# Altium footprint library Footprint-Lib-PhilsLab.PcbLib: 352 footprints (part 8 of 22)
Each footprint in its own frame and in the unit in brackets; x right, y up, seen from the top. Pads: shape width x height; smd on the part's side, far side on the other; paste and mask are expansions set on the pad; w line width, h text height; cw(c..) or ccw(c..) is an arc to the next point about the centre after c.
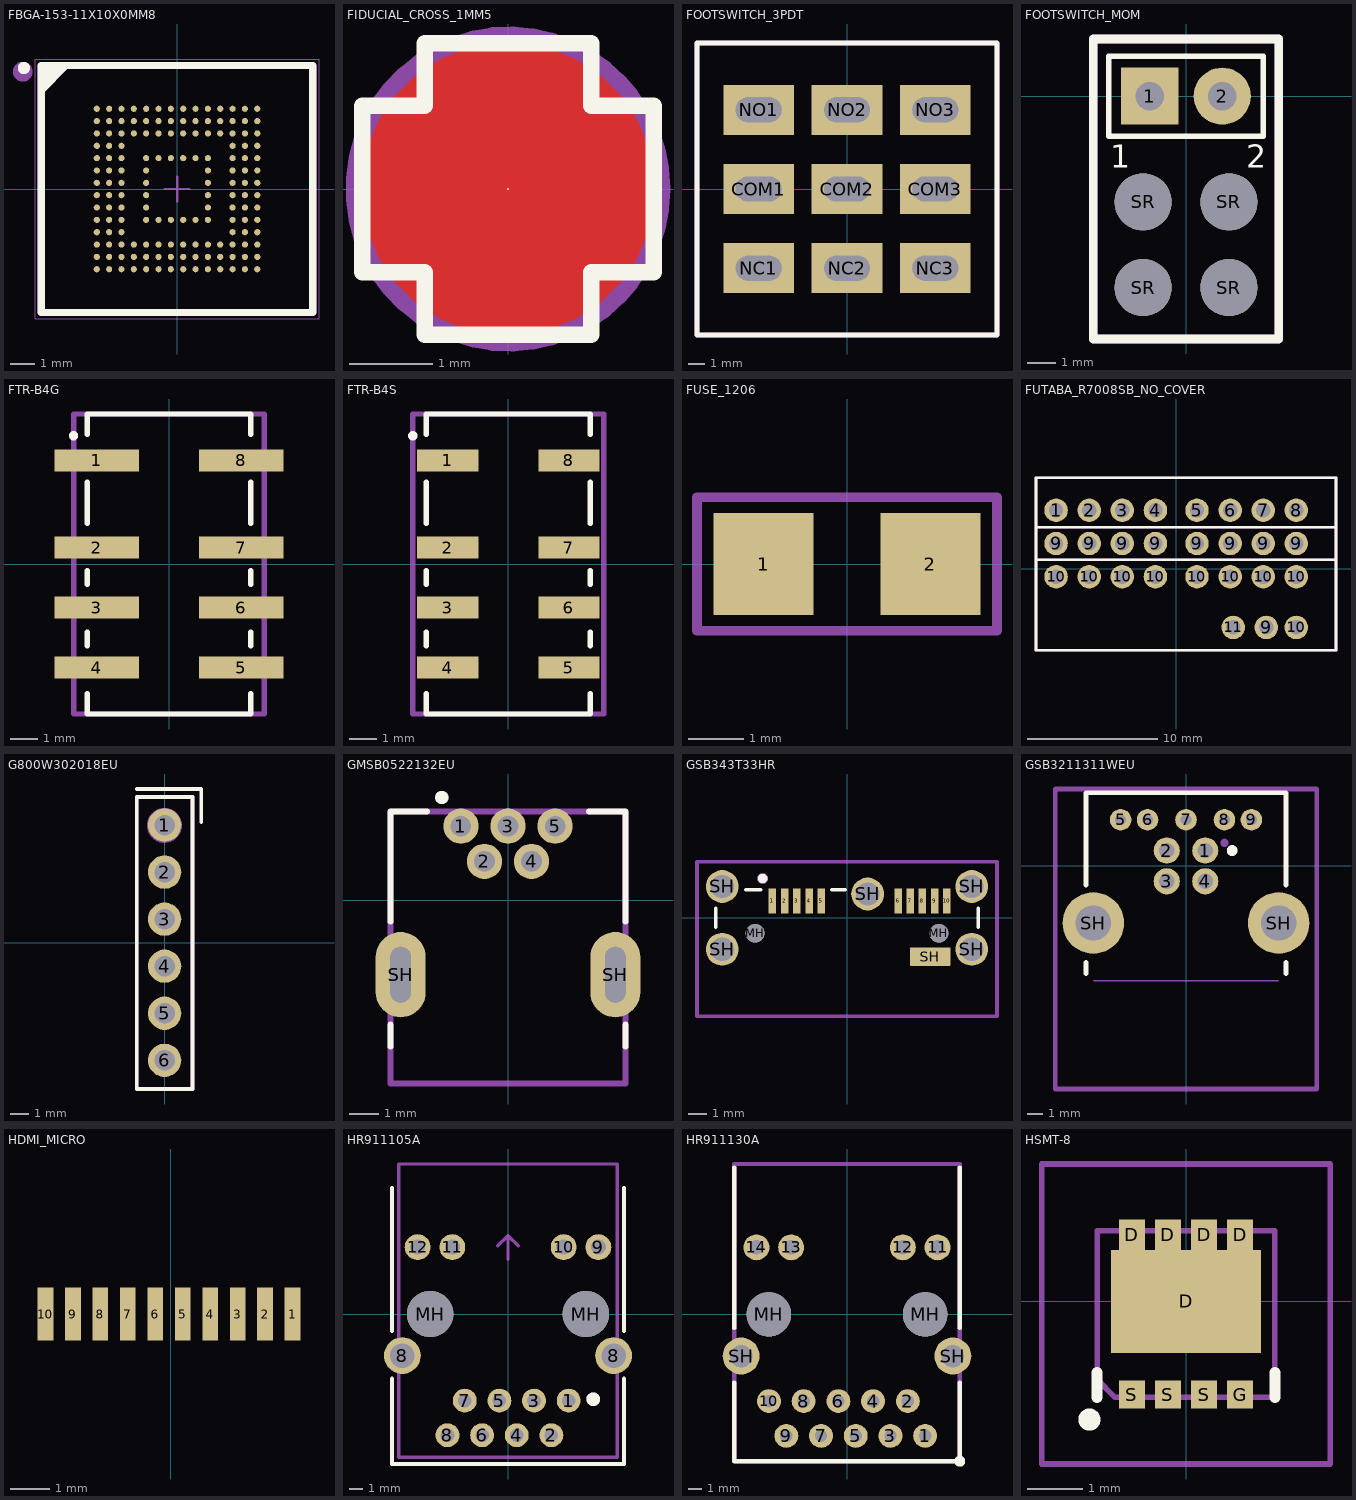
[diagram p7: the footprints below, top view; thin cyan lines are the x and y axes]

## FBGA-153-11X10X0MM8 [mm]
height 0.8
pads (152):
  round 0.25 smd: A1(-3.25,3.25) A2(-2.75,3.25) A3(-2.25,3.25) A4(-1.75,3.25) A5(-1.25,3.25) A6(-0.75,3.25) A7(-0.25,3.25) A8(0.25,3.25) A9(0.75,3.25) A10(1.25,3.25) A11(1.75,3.25) A12(2.25,3.25) A13(2.75,3.25) A14(3.25,3.25) B1(-3.25,2.75) B2(-2.75,2.75) B3(-2.25,2.75) B4(-1.75,2.75) B5(-1.25,2.75) B6(-0.75,2.75) B7(-0.25,2.75) B8(0.25,2.75) B9(0.75,2.75) B10(1.25,2.75) B11(1.75,2.75) B12(2.25,2.75) B13(2.75,2.75) B14(3.25,2.75) C1(-3.25,2.25) C2(-2.75,2.25) C3(-2.25,2.25) C4(-1.75,2.25) C5(-1.25,2.25) C6(-0.75,2.25) C7(-0.25,2.25) C8(0.25,2.25) C9(0.75,2.25) C10(1.25,2.25) C11(1.75,2.25) C12(2.25,2.25) C13(2.75,2.25) C14(3.25,2.25) D1(-3.25,1.75) D2(-2.75,1.75) D3(-2.25,1.75) D12(2.25,1.75) D13(2.75,1.75) D14(3.25,1.75) E1(-3.25,1.25) E2(-2.75,1.25) E3(-2.25,1.25) E5(-1.25,1.25) E6(-0.75,1.25) E7(-0.25,1.25) E8(0.25,1.25) E9(0.75,1.25) E10(1.25,1.25) E12(2.25,1.25) E13(2.75,1.25) E14(3.25,1.25) F1(-3.25,0.75) F2(-2.75,0.75) F3(-2.25,0.75) F5(-1.25,0.75) F10(1.25,0.75) F12(2.25,0.75) F13(2.75,0.75) F14(3.25,0.75) G1(-3.25,0.25) G2(-2.75,0.25) G3(-2.25,0.25) G5(-1.25,0.25) G10(1.25,0.25) G12(2.25,0.25) G13(2.75,0.25) G14(3.25,0.25) H1(-3.25,-0.25) H2(-2.75,-0.25) H3(-2.25,-0.25) H5(-1.25,-0.25) H10(1.25,-0.25) H12(2.25,-0.25) H13(2.75,-0.25) H14(3.25,-0.25) J1(-3.25,-0.75) J2(-2.75,-0.75) J3(-2.25,-0.75) J5(-1.25,-0.75) J10(1.25,-0.75) J12(2.25,-0.75) J13(2.75,-0.75) J14(3.25,-0.75) K1(-3.25,-1.25) K2(-2.75,-1.25) K3(-2.25,-1.25) K5(-1.25,-1.25) K6(-0.75,-1.25) K7(-0.25,-1.25) K8(0.25,-1.25) K9(0.75,-1.25) K10(1.25,-1.25) K12(2.25,-1.25) K13(2.75,-1.25) K14(3.25,-1.25) L1(-3.25,-1.75) L2(-2.75,-1.75) L3(-2.25,-1.75) L12(2.25,-1.75) L13(2.75,-1.75) L14(3.25,-1.75) M1(-3.25,-2.25) M2(-2.75,-2.25) M3(-2.25,-2.25) M4(-1.75,-2.25) M5(-1.25,-2.25) M6(-0.75,-2.25) M7(-0.25,-2.25) M8(0.25,-2.25) M9(0.75,-2.25) M10(1.25,-2.25) M11(1.75,-2.25) M12(2.25,-2.25) M13(2.75,-2.25) M14(3.25,-2.25) N1(-3.25,-2.75) N2(-2.75,-2.75) N3(-2.25,-2.75) N4(-1.75,-2.75) N5(-1.25,-2.75) N6(-0.75,-2.75) N7(-0.25,-2.75) N8(0.25,-2.75) N9(0.75,-2.75) N10(1.25,-2.75) N11(1.75,-2.75) N12(2.25,-2.75) N13(2.75,-2.75) N14(3.25,-2.75) P1(-3.25,-3.25) P2(-2.75,-3.25) P3(-2.25,-3.25) P4(-1.75,-3.25) P5(-1.25,-3.25) P6(-0.75,-3.25) P7(-0.25,-3.25) P8(0.25,-3.25) P9(0.75,-3.25) P10(1.25,-3.25) P11(1.75,-3.25) P12(2.25,-3.25) P13(2.75,-3.25) P14(3.25,-3.25)
Top Overlay:
  circle w0.25: c-6.2,4.9 r0.125
  region: -4.5,5 -5.5,4 -5.5,5
  lines w0.3: -5.5,4 -4.5,5 ; -5.5,-5 5.5,-5 5.5,5 -5.5,5 -5.5,-5
Mechanical 13:
  circle w0.5: c-6.25,4.75 r0.15
  lines w0.3: -5.5,-5 5.5,-5 5.5,5 -5.5,5 -5.5,-5
  text "'.Designator'" at -5.665,-0.417 h1
Mechanical 15:
  lines w0.05: -5.75,-5.25 5.75,-5.25 5.75,5.25 -5.75,5.25 -5.75,-5.25
  lines w0.1: -0.5,0 0.5,0 ; 0,-0.5 0,0.5
3D body "FBGA-153-11X10X0MM8.step": height 0.8, standoff 0, extent -5.5,-5 5.5,5

## FIDUCIAL_CROSS_1MM5 [mil]
pads (1):
  round 1 smd paste-19.68: FM(0,0)
Top Layer:
  pour cut-out: 0,68.9 6.79,68.9 20.1,66.25 32.64,61.06 43.92,53.52 53.52,43.92 61.06,32.64 66.25,20.1 68.9,6.79 68.9,0 68.9,-6.79 66.25,-20.1 61.06,-32.64 53.52,-43.92 43.92,-53.52 32.64,-61.06 20.1,-66.25 6.79,-68.9 0,-68.9 -6.79,-68.9 -20.1,-66.25 -32.64,-61.06 -43.92,-53.52 -53.52,-43.92 -61.06,-32.64 -66.25,-20.1 -68.9,-6.79 -68.9,0 -68.9,6.79 -66.25,20.1 -61.06,32.64 -53.52,43.92 -43.92,53.52 -32.64,61.06 -20.1,66.25 -6.79,68.9
  region: -9.84,-29.53 -9.84,-9.84 -29.53,-9.84 -29.53,9.84 -9.84,9.84 -9.84,29.53 9.84,29.53 9.84,9.84 29.53,9.84 29.53,-9.84 9.84,-9.84 9.84,-29.53
Top Overlay:
  lines w7.87: -68.9,-39.37 -68.9,0 -68.9,39.37 -39.37,39.37 -39.37,68.9 39.37,68.9 39.37,39.37 68.9,39.37 68.9,-39.37 39.37,-39.37 39.37,-68.9 -39.37,-68.9 -39.37,-39.37 -68.9,-39.37
Top Solder:
  region: -59.06,29.53 -29.53,29.53 -29.53,59.06 29.53,59.06 29.53,29.53 59.06,29.53 59.06,-29.53 29.53,-29.53 29.53,-59.06 -29.53,-59.06 -29.53,-29.53 -59.06,-29.53
Mechanical 13:
  circle w11.81: c0,0 r70.98
  text "'.Designator'" at -223.03,-16.4 h39.37

## FOOTSWITCH_3PDT [mm]
pads (9):
  rect 4.25x3 hole 1.5 slot 2.75 at 0 deg: COM1(-5.3,0) COM2(0,0) COM3(5.3,0) NC1(-5.3,-4.75) NC2(0,-4.75) NC3(5.3,-4.75) NO1(-5.3,4.75) NO2(0,4.75) NO3(5.3,4.75)
Top Overlay:
  lines w0.3: -9,-8.75 9,-8.75 9,8.75 -6.5,8.75 -9,8.75 -9,-8.75
Mechanical 13:
  lines w0.3: -9,-8.75 9,-8.75 9,8.75 -9,8.75 -9,-8.75
  text "'.Designator'" at -5.665,-0.417 h1
3D body "3PDT_Footswitch_NoNutNoWasher.step": height 37.96, standoff -4.14, extent -9.8,-8.5 9.8,8.5

## FOOTSWITCH_MOM [mm]
pads (6):
  rect 2x2 hole 1 mask+0.1: 1(-1.27,0)
  round 2 hole 1 mask+0.1: 2(1.27,0)
  round 2 hole 2 unplated mask+0.1: SR(-1.5,-6.7) SR(-1.5,-3.7) SR(1.5,-6.7) SR(1.5,-3.7)
Top Overlay:
  lines w0.2: -2.7,-1.4 -2.7,1.4 2.7,1.4 2.7,-1.4 -2.7,-1.4
  lines w0.3: -3.25,-8.5 -3.25,2 3.25,2 3.25,-8.5 -3.25,-8.5
  text "2" at 2.117,-2.5 h0.8
  text "1" at -2.65,-2.5 h0.8
Mechanical 13:
  lines w0.3: -3.25,-8.5 -3.25,2 3.25,2 3.25,-8.5 -3.25,-8.5
  text "STRAIN RELIEF" at -2.399,-6.52 h0.8
  text "2" at 2.117,-2.5 h0.8
  text "1" at -2.65,-2.5 h0.8
  text "'.Designator'" at -5.665,-0.417 h1
3D body "Header_1x2.STEP": height 8.44, standoff -2.54, extent -2.535,-1.273 2.545,1.267

## FTR-B4G [mm]
pads (8):
  rect 3.1x0.8 smd: 1(-2.65,3.8) 2(-2.65,0.6) 3(-2.65,-1.6) 4(-2.65,-3.8) 5(2.65,-3.8) 6(2.65,-1.6) 7(2.65,0.6) 8(2.65,3.8)
Top Overlay:
  circle w0.3: c-3.5,4.7 r0.021
  lines w0.2: -3,-4.75 -3,-5.5 3,-5.5 3,-4.75 ; -3,-3 -3,-2.5 ; -3,-0.75 -3,-0.25 ; -3,1.5 -3,3 ; -3,4.75 -3,5.5 3,5.5 3,4.75 ; 3,-3 3,-2.5 ; 3,-0.75 3,-0.25 ; 3,1.5 3,3
Mechanical 13:
  circle w0.3: c-2.2,3.8 r0.108
  lines w0.2: -3.5,-5.5 -3.5,5.5 3.5,5.5 3.5,-5.5 -3.5,-5.5
  text ".Designator" at -4.998,-0.333 h1
3D body "FTR-B4G.step": height 9.72, standoff 0.01, extent -3.706,-5.3 3.7,5.3

## FTR-B4S [mm]
pads (8):
  rect 2.25x0.8 smd: 1(-2.225,3.8) 2(-2.225,0.6) 3(-2.225,-1.6) 4(-2.225,-3.8) 5(2.225,-3.8) 6(2.225,-1.6) 7(2.225,0.6) 8(2.225,3.8)
Top Overlay:
  circle w0.3: c-3.5,4.7 r0.021
  lines w0.2: -3,-4.75 -3,-5.5 3,-5.5 3,-4.75 ; -3,-3 -3,-2.5 ; -3,-0.75 -3,-0.25 ; -3,1.5 -3,3 ; -3,4.75 -3,5.5 3,5.5 3,4.75 ; 3,-3 3,-2.5 ; 3,-0.75 3,-0.25 ; 3,1.5 3,3
Mechanical 13:
  circle w0.3: c-2.2,3.8 r0.108
  lines w0.2: -3.5,-5.5 3.5,-5.5 3.5,5.5 -3.5,5.5 -3.5,-5.5
  text ".Designator" at -4.998,-0.333 h1
3D body "FTR-B4S.step": height 9.72, standoff 0.01, extent -2.852,-5.3 2.85,5.3

## FUSE_1206 [mm]
pads (2):
  rect 1.8x1.84 smd: 1(-1.5,0) 2(1.5,0)
Mechanical 13:
  lines w0.175: -2.7,-1.2 -2.7,1.2 2.7,1.2 2.7,-1.2 -2.7,-1.2
  text "'.Designator'" at -5.665,-0.417 h1
3D body "Fuse_1206.stp": height 0.84, standoff 0.01, extent -1.652,-0.815 1.652,0.815

## FUTABA_R7008SB_NO_COVER [mm]
pads (27):
  round 1.8 hole 1.1: 1(-9.212,4.487) 2(-6.672,4.487) 3(-4.132,4.487) 4(-1.592,4.487) 5(1.593,4.487) 6(4.133,4.487) 7(6.673,4.487) 8(9.213,4.487) 9(-9.212,1.947) 9(-6.672,1.947) 9(-4.132,1.947) 9(-1.592,1.947) 9(1.593,1.947) 9(4.133,1.947) 9(6.673,1.947) 9(6.913,-4.487) 9(9.213,1.947) 10(-9.212,-0.593) 10(-6.672,-0.593) 10(-4.132,-0.593) 10(-1.592,-0.593) 10(1.593,-0.593) 10(4.133,-0.593) 10(6.673,-0.593) 10(9.213,-4.487) 10(9.213,-0.593) 11(4.373,-4.487)
Top Overlay:
  lines w0.2: -10.75,0.7 12.25,0.7 ; -10.75,3.2 12.25,3.2 ; -10.75,-6.25 -10.75,7 12.25,7 12.25,-6.25 -10.75,-6.25
Mechanical 13:
  lines w0.2: -10.75,0.7 12.25,0.7 ; -10.75,3.2 12.25,3.2 ; -10.75,-6.25 -10.75,7 12.25,7 12.25,-6.25 -10.75,-6.25
  text "'.Designator'" at -5.665,-0.417 h1
3D body "FUTABA_R7008SB_NO_COVER.STEP": height 39.51, standoff -5.99, extent -10.45,-5.94 11.95,6.76

## G800W302018EU [mm]
pads (6):
  round 1.8 hole 1.1 mask+0.07: 1(0,6.35) 2(0,3.81) 3(0,1.27) 4(0,-1.27) 5(0,-3.81) 6(0,-6.35)
Top Overlay:
  lines w0.2: -1.5,8.3 1.972,8.3 1.972,6.5 ; -1.5,-7.9 -1.5,7.863 1.5,7.863 1.5,-7.9 -1.5,-7.9
Mechanical 13:
  circle w0.25: c-0.012,6.336 r0.823
  lines w0.2: -1.5,-7.9 -1.5,7.864 1.5,7.864 1.5,-7.9 -1.5,-7.9
  text "'.Designator'" at -5.84,-0.925 h1
3D body "g800w302xxxeu.stp": height 8.61, standoff -2.99, extent -1.25,-7.62 1.25,7.62

## GMSB0522132EU [mm]
pads (7):
  round 1.2 hole 0.7 mask+0.3: 1(-1.6,2.525) 2(-0.8,1.325) 3(0,2.525) 4(0.8,1.325) 5(1.6,2.525)
  oval 1.7x2.9 hole 0.7 slot 1.9 at 90 deg: SH(-3.65,-2.525) SH(3.65,-2.525)
Top Overlay:
  circle w0.25: c-2.25,3.5 r0.1
  lines w0.2: -4,-4.975 -4,-4.225 ; -4,-0.725 -4,3.025 -2.75,3.025 ; 2.75,3.025 4,3.025 4,-0.725 ; 4,-4.975 4,-4.225
Mechanical 13:
  circle w0.25: c-2.25,3.5 r0.1
  lines w0.2: -4,-6.225 -4,3.025 4,3.025 4,-6.225 -4,-6.225
  text "'.Designator'" at -5.665,-0.417 h1
3D body "GMSB0522132EU.stp": height 3.91, standoff -2.84, extent -3.95,-6.275 3.95,3.125

## GSB343T33HR [mm]
pads (18):
  rrect10% 0.4x1.35 smd: 1(-3.975,0.905) 2(-3.325,0.905) 3(-2.675,0.905) 4(-2.025,0.905) 5(-1.375,0.905) 6(2.725,0.905) 7(3.375,0.905) 8(4.025,0.905) 9(4.675,0.905) 10(5.325,0.905)
  round 1 hole 1 unplated: MH(-4.9,-0.825) MH(4.9,-0.825)
  round 1.75 hole 1.25: SH(-6.65,-1.675) SH(-6.65,1.675) SH(1.1,1.275) SH(6.65,-1.675) SH(6.65,1.675)
  rrect10% 2.18x0.98 smd: SH(4.44,-2.065)
Top Overlay:
  circle w0.3: c-4.5,2.1 r0.1
  lines w0.2: -7,-0.5 -7,0.5 ; -5.4,1.5 -4.6,1.5 ; -0.8,1.5 -0.1,1.5 ; 7,-0.5 7,0.5
Mechanical 13:
  circle w0.3: c-4.5,2.1 r0.141
  lines w0.2: -8,-5.25 -8,-1.75 -8,3 8,3 8,-5.25 -8,-5.25
  text "'.Designator'" at -5.665,-0.417 h1
3D body "gsb343t33hr.stp": height 5.5, standoff -0.75, extent -6.78,-5.078 6.77,2.175

## GSB3211311WEU [mm]
pads (11):
  round 1.7 hole 1: 1(1.25,1) 2(-1.25,1) 3(-1.25,-1) 4(1.25,-1)
  round 1.4 hole 0.7: 5(-4.25,3) 6(-2.5,3) 7(0,3) 8(2.5,3) 9(4.25,3)
  round 4 hole 2.3: SH(-6.02,-3.71) SH(6.02,-3.71)
Top Overlay:
  circle w0.5: c3,1 r0.1
  lines w0.3: -6.5,-7 -6.5,-6.25 ; -6.5,-1.25 -6.5,4.75 6.5,4.75 6.5,-1.25 ; 6.5,-7 6.5,-6.25
Mechanical 13:
  circle w0.3: c2.5,1.5 r0.118
  lines w0.12: -6,-7.46 6,-7.46
  lines w0.3: -8.5,-14.5 -8.5,5 8.5,5 8.5,-14.5 -8.5,-14.5
  text "'.Designator'" at -5.815,-0.9 h1
  text "PCB EDGE" at -2.032,-7.2 h0.5
3D body "gsb3211311weu.stp": height 13.13, standoff -4.09, extent -6.3,-13.95 6.3,4.4

## HDMI_MICRO [mm]
pads (10):
  rect 0.4x1.35 smd: 1(3.1,9.6) 2(2.4,9.6) 3(1.7,9.6) 4(1,9.6) 5(0.3,9.6) 6(-0.4,9.6) 7(-1.1,9.6) 8(-1.8,9.6) 9(-2.5,9.6) 10(-3.2,9.6)
3D body "MicroHDMI-PCBMount.STEP": height 0.61, standoff -1.59, extent -4.3,-3.9 4.3,10

## HR911105A [mm]
pads (16):
  round 1.75 hole 1: 1(4.45,-6.35) 2(3.18,-8.89) 3(1.91,-6.35) 4(0.64,-8.89) 5(-0.63,-6.35) 6(-1.9,-8.89) 7(-3.17,-6.35) 8(-4.44,-8.89)
  round 2.7 hole 1.8: 8(-7.745,-3.05) 8(7.745,-3.05)
  round 1.9 hole 1.1: 9(6.625,4.9) 10(4.085,4.9) 11(-4.085,4.9) 12(-6.625,4.9)
  round 3.4 hole 3.4 unplated: MH(-5.715,0) MH(5.715,0)
Top Overlay:
  circle w0.5: c6.25,-6.25 r0.25
  lines w0.3: -8.5,-4.75 -8.5,-11 8.5,-11 8.5,-4.75 ; -8.5,-1.25 -8.5,9.25 ; 8.5,-1.25 8.5,9.25
Mechanical 13:
  circle w0.5: c6.25,-6.25 r0.25
  lines w0.254: -0.75,5 0,5.75 ; 0,4 0,5.75 ; 0.75,5 0,5.75 ; -8,-10.5 -8,11 8,11 8,-10.5 -8,-10.5
  text "'.Designator'" at -5.665,-0.417 h1
3D body "HR911105A.step": height 13.51, standoff -2.99, extent -7.93,-10.48 7.95,10.92

## HR911130A [mm]
pads (18):
  round 1.75 hole 0.9: 1(5.72,-8.89) 2(4.45,-6.35) 3(3.18,-8.89) 4(1.91,-6.35) 5(0.64,-8.89) 6(-0.63,-6.35) 7(-1.9,-8.89) 8(-3.17,-6.35) 9(-4.44,-8.89) 10(-5.71,-6.35)
  round 1.9 hole 1.05: 11(6.625,4.9) 12(4.085,4.9) 13(-4.085,4.9) 14(-6.625,4.9)
  round 3.25 hole 3.25 unplated: MH(-5.715,0) MH(5.715,0)
  round 2.7 hole 1.65: SH(-7.745,-3.05) SH(7.745,-3.05)
Top Overlay:
  circle w0.4: c8.25,-10.75 r0.2
  lines w0.3: -8.25,-5 -8.25,-10.75 8.25,-10.75 8.25,-5 ; -8.25,-1 -8.25,10.75 ; 8.25,-1 8.25,10.75
Mechanical 13:
  lines w0.3: -8.25,-10.75 8.25,-10.75 8.25,11 -8.25,11 -8.25,-10.75
  text "'.Designator'" at -5.665,-0.417 h1
  text "1" at 7.333,-9.5 h1
3D body "HR911130A.STEP": height 13.51, standoff -2.99, extent -7.94,-10.49 7.94,10.91

## HSMT-8 [mm]
pads (9):
  rect 0.47x0.55 smd: D(-0.975,1.2) D(-0.325,1.2) D(0.325,1.2) D(0.975,1.2)
  rect 2.7x1.85 smd: D(0,0)
  rect 0.47x0.5 smd: G(0.975,-1.675) S(-0.975,-1.675) S(-0.325,-1.675) S(0.325,-1.675)
Top Overlay:
  lines w0.2: -1.6,-1.725 -1.6,-1.275 ; 1.6,-1.725 1.6,-1.275 ; -1.839,-2.125 ccw(c-1.739,-2.125) -1.639,-2.125 ccw(c-1.739,-2.125) -1.839,-2.125
Mechanical 13:
  lines w0.1: -1.6,-1.4 -1.6,1.275 1.6,1.275 1.6,-1.725 -1.275,-1.725 -1.6,-1.4
  text "'.Designator'" at -6.315,-1.4 h1
Mechanical 15:
  lines w0.1: -2.6,-2.925 2.6,-2.925 2.6,2.475 -2.6,2.475 -2.6,-2.925
3D body "RQ3E150GNTB.stp": height 1, standoff 0, extent -1.6,-1.878 1.6,1.428